# Altium schematic symbol library NTM_Capacitors.SchLib: 15 symbols (part 2 of 2)
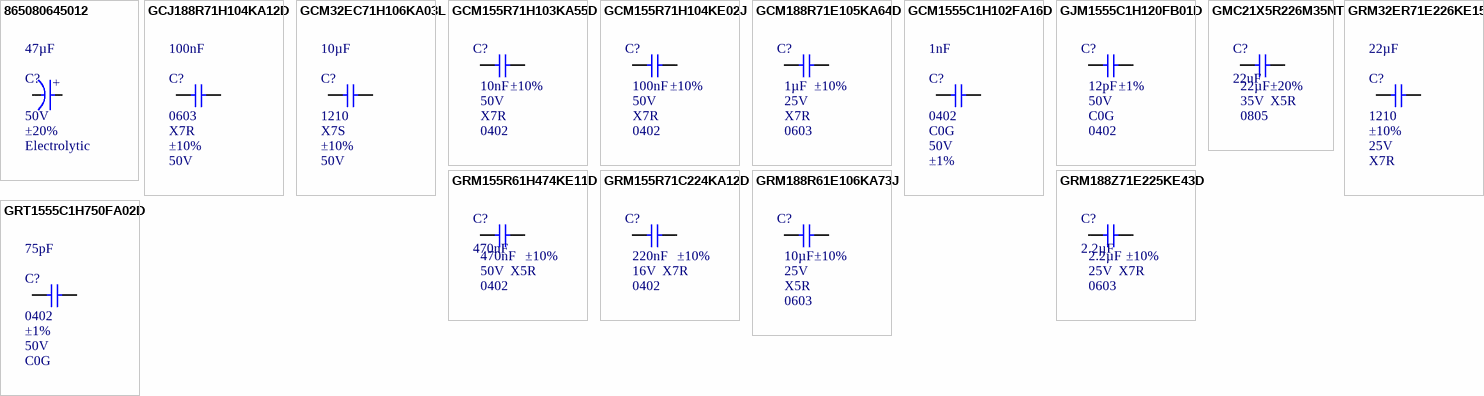
[diagram p1: symbols 865080645012 to GRT1555C1H750FA02D]

## GRT1555C1H750FA02D
designator C?, comment Dielectric Material: C0G  Voltage Rating: 50V  Tolerance: ±1%  Case/Package: 0402  (hidden comment: 75pF)
50V 75pF Ceramic Capacitor, Multilayer, Ceramic, 50V, 1% +Tol, 1% -Tol, C0G, 0.000075uF, Surface Mount, 1005M/0402; Manufacturer: Murata; Manufacturer Part Number: GRT1555C1H750FA02D; Manufacturer Lifecycle Status: IN PRODUCTION; Temperature Coefficient: 30ppm/°C; Supplier 1: DigiKey; RoHS: Compliant; Category: Ceramic Capacitors; Stock 1: 3502; Pricing 1: 1=0.1, 10=0.038, 50=0.0256, 100=0.0219, 500=0.01568, 1000=0.01379, 2500=0.0118, 5000=0.0106 (USD); Height: 500µm; Length: 1mm; Lifecycle Status: Production; Material: Ceramic; Max Operating Temperature: 125°C; Min Operating Temperature: -55°C; Mount: Surface Mount; Number of Terminals: 2; Ratings: AEC-Q200; REACH SVHC: Yes; Thickness: 500µm; Voltage Rating (DC): 50V; Width: 500µm; ComponentLink1URL: https://datasheet.octopart.com:443/GRT1555C1H750FA02D-Murata-datasheet-141283559.pdf?src-supplier=Geoflip; ComponentLink1Description: https://datasheet.octopart.com:443/GRT1555C1H750FA02D-Murata-datasheet-141283559.pdf?src-supplier=Geoflip; ComponentLink2URL: https://datasheet.octopart.com:443/GRT1555C1H750FA02D-Murata-datasheet-140710861.pdf?src-supplier=Ciiva; ComponentLink2Description: https://datasheet.octopart.com:443/GRT1555C1H750FA02D-Murata-datasheet-140710861.pdf?src-supplier=Ciiva; ComponentLink3URL: https://datasheet.octopart.com:443/GRT1555C1H750FA02D-Murata-datasheet-138748567.pdf?src-supplier=Ciiva; ComponentLink3Description: https://datasheet.octopart.com:443/GRT1555C1H750FA02D-Murata-datasheet-138748567.pdf?src-supplier=Ciiva; ComponentLink4URL: http://sigma.octopart.com:80/reach_statement/Murata-company-16.pdf?src-supplier=Compliance+Statements; ComponentLink4Description: http://sigma.octopart.com:80/reach_statement/Murata-company-16.pdf?src-supplier=Compliance+Statements; Supplier Part Number 1: 490-GRT1555C1H750FA02DCT-ND; Capacitance: 75pF
footprint 0402_Cap
pins: 1, 2